# Altium footprint library PedalParts.PcbLib: 1 footprints
Each footprint in its own frame and in the unit in brackets; x right, y up, seen from the top. Pads: shape width x height; smd on the part's side, far side on the other; paste and mask are expansions set on the pad; w line width, h text height; cw(c..) or ccw(c..) is an arc to the next point about the centre after c.
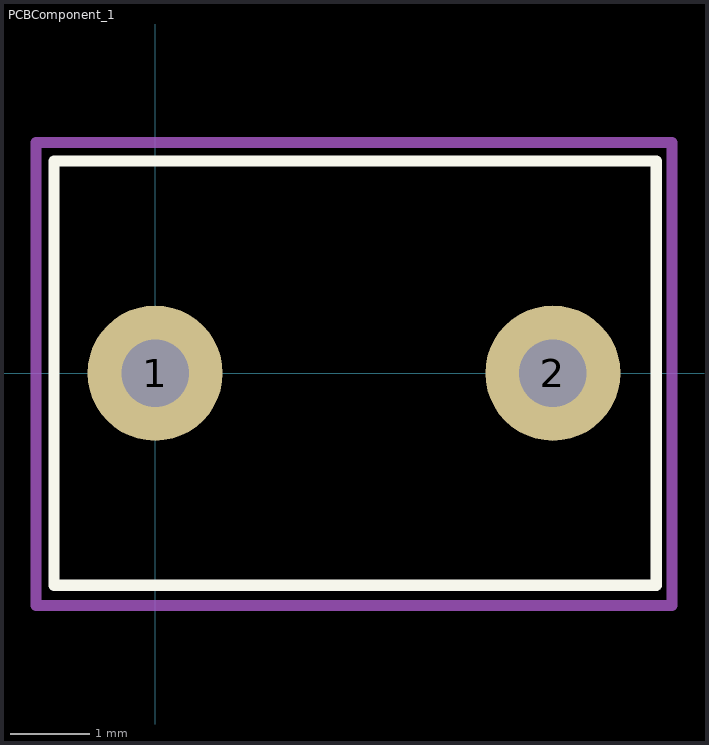
[diagram p0: the footprint, top view; thin cyan lines are the x and y axes]

## PCBComponent_1 [mm]
pads (2):
  round 1.7 hole 0.85: 1(0,0) 2(5,0)
Top Overlay:
  lines w0.14: -1.27,-2.667 6.3,-2.667 6.3,2.667 -1.27,2.667 -1.27,-2.667
Mechanical 1:
  lines w0.14: -1.5,-2.921 -1.5,2.9 6.5,2.9 6.5,-2.921 -1.5,-2.921
3D body: height 10, standoff 0, extent -1.1,-2.5 6.1,2.5